# Altium footprint library ADAMTECH_PH2RA-10-UA.PcbLib: 1 footprints
Each footprint in its own frame and in the unit in brackets; x right, y up, seen from the top. Pads: shape width x height; smd on the part's side, far side on the other; paste and mask are expansions set on the pad; w line width, h text height; cw(c..) or ccw(c..) is an arc to the next point about the centre after c.
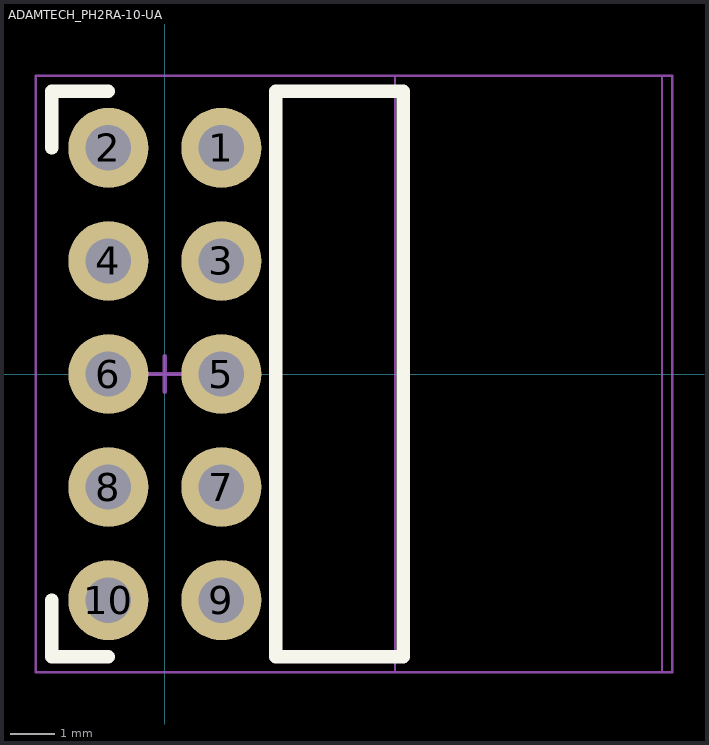
[diagram p0: the footprint, top view; thin cyan lines are the x and y axes]

## ADAMTECH_PH2RA-10-UA [mm]
height 5
pads (10):
  round 1.8 hole 1.02: 1(1.27,5.08) 2(-1.27,5.08) 3(1.27,2.54) 4(-1.27,2.54) 5(1.27,0) 6(-1.27,0) 7(1.27,-2.54) 8(-1.27,-2.54) 9(1.27,-5.08) 10(-1.27,-5.08)
Top Overlay:
  lines w0.3: -2.54,-5.08 -2.54,-6.35 -1.27,-6.35 ; -2.54,5.08 -2.54,6.35 -1.27,6.35 ; 2.49,-6.35 2.49,6.35 5.36,6.35 5.36,-6.35 2.49,-6.35
Mechanical 13:
  lines w0.1: 2.49,-6.35 5.36,-6.35 5.36,6.35 2.49,6.35 2.49,-6.35
Mechanical 15:
  lines w0.05: 5.17,-6.7 5.17,6.7 ; 11.17,-6.7 11.17,6.7 ; -2.9,-6.7 11.4,-6.7 11.4,6.7 -2.9,6.7 -2.9,-6.7
  lines w0.1: -0.4,0 0.4,0 ; 0,-0.4 0,0.4
  text "Plastic End (Nom.)" at 4.953,-3.16 h0.5
  text "Pin End (Nom.)" at 10.953,-2.584 h0.5
3D body "ADAMTECH_PH2RA-10-UA.STEP": height 5.01, standoff -2.99, extent -1.588,-6.35 11.172,6.35